# Altium footprint library PTZ.PcbLib: 51 footprints (part 1 of 4)
Each footprint in its own frame and in the unit in brackets; x right, y up, seen from the top. Pads: shape width x height; smd on the part's side, far side on the other; paste and mask are expansions set on the pad; w line width, h text height; cw(c..) or ccw(c..) is an arc to the next point about the centre after c.
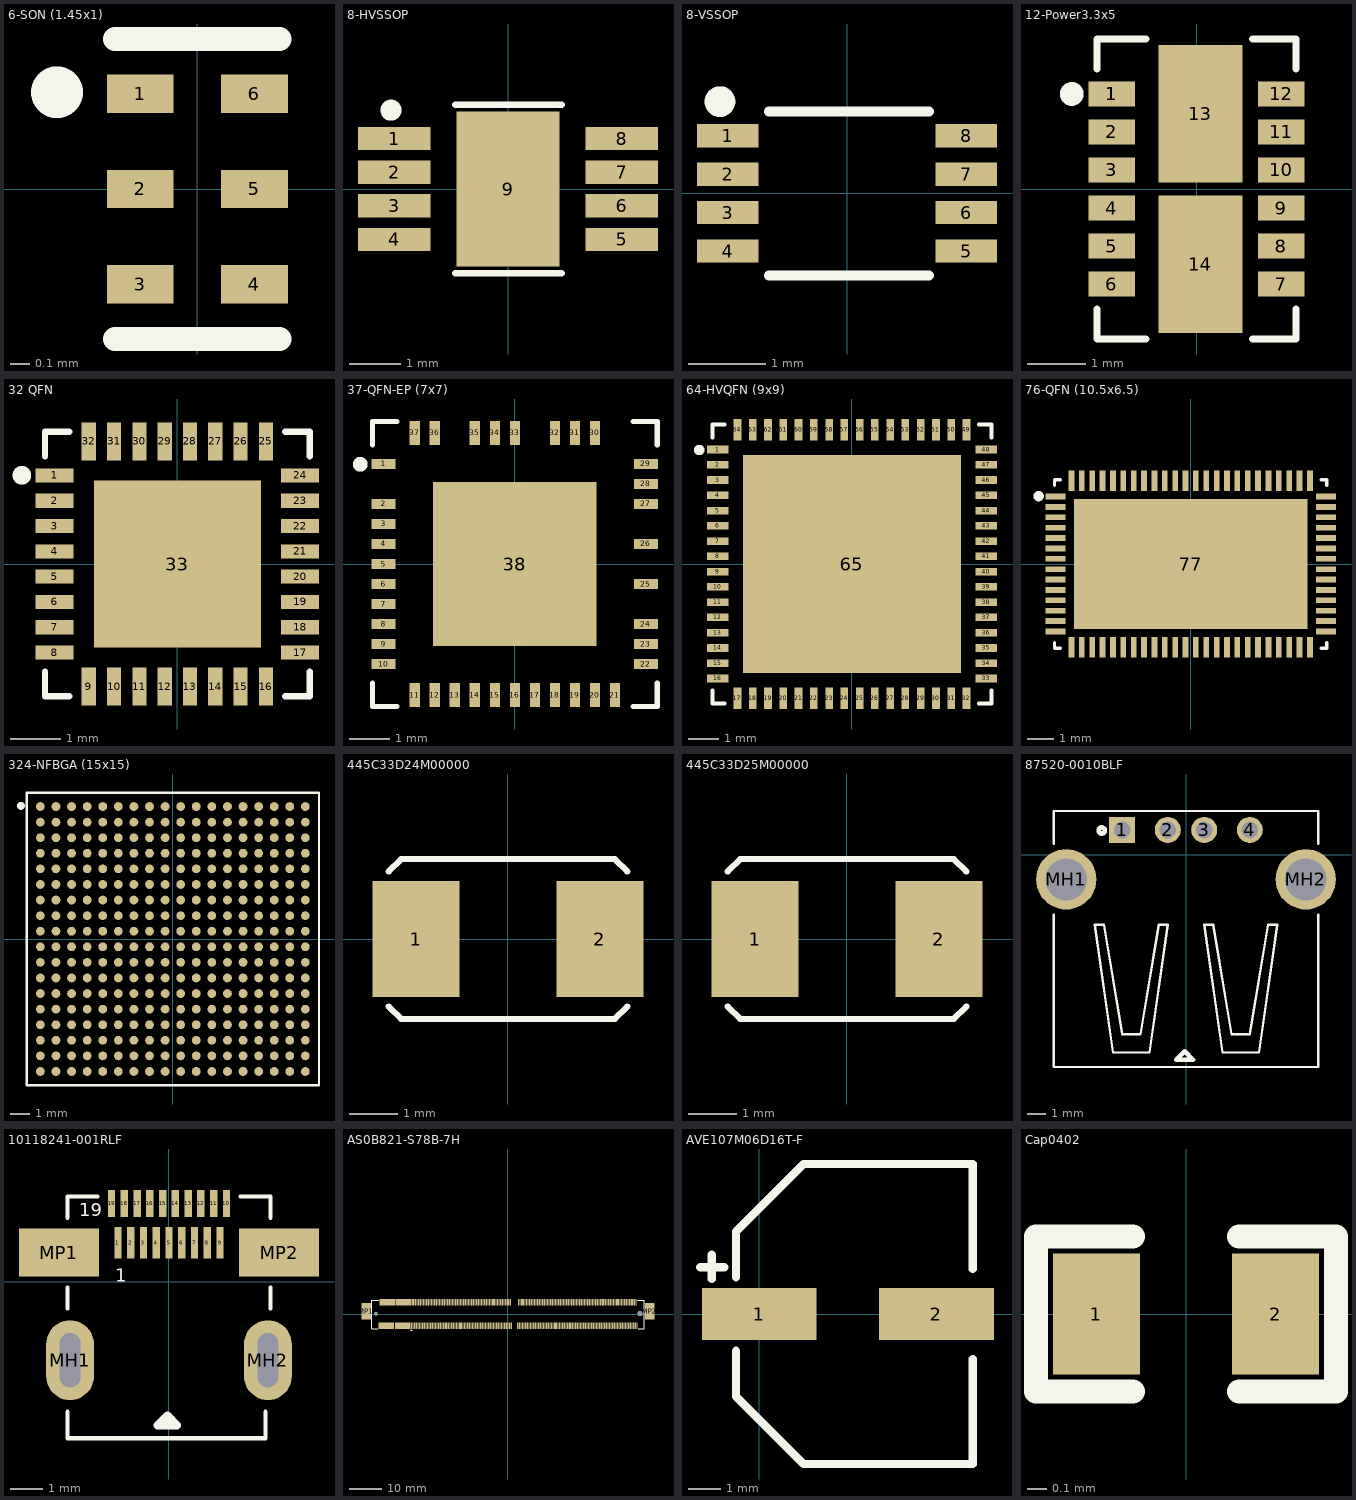
[diagram p0: the footprints below, top view; thin cyan lines are the x and y axes]

## 6-SON (1.45x1) [mm]
pads (6):
  rect 0.35x0.2 smd mask+0.102: 1(-0.3,0.5) 2(-0.3,0) 3(-0.3,-0.5) 4(0.3,-0.5) 5(0.3,0) 6(0.3,0.5)
Top Overlay:
  circle w0.2: c-0.737,0.508 r0.036
  lines w0.127: -0.432,-0.787 0.432,-0.787 ; -0.432,0.787 0.432,0.787
3D body "TPD4S012DRYR--3DModel-STEP-56544.STEP": height 0.6, standoff 0, extent -0.5,-0.725 0.5,0.725

## 8-HVSSOP [mm]
pads (9):
  rect 1.4x0.45 smd mask+0.102: 1(-2.2,0.975) 2(-2.2,0.325) 3(-2.2,-0.325) 4(-2.2,-0.975) 5(2.2,-0.975) 6(2.2,-0.325) 7(2.2,0.325) 8(2.2,0.975)
  rect 2x3 smd mask+0.102: 9(0,0)
Top Overlay:
  circle w0.254: c-2.261,1.524 r0.076
  lines w0.127: -1.016,-1.626 1.041,-1.626 ; -1.016,1.626 1.041,1.626
3D body "TPS2051BDGN.STEP": height 1.1, standoff 0, extent -2.45,-1.5 2.45,1.5

## 8-VSSOP [mm]
pads (8):
  rect 0.8x0.3 smd mask+0.102: 1(-1.55,0.75) 2(-1.55,0.25) 3(-1.55,-0.25) 4(-1.55,-0.75) 5(1.55,-0.75) 6(1.55,-0.25) 7(1.55,0.25) 8(1.55,0.75)
Top Overlay:
  circle w0.254: c-1.651,1.194 r0.072
  lines w0.127: -1.016,-1.067 1.067,-1.067 ; -1.016,1.067 1.067,1.067
3D body "SN74LVC2G241DCUT.STEP": height 0.9, standoff 0, extent -1.55,-1 1.55,1

## 12-Power3.3x5 [mm]
pads (15):
  rect 0.8x0.42 smd mask+0.102: 1(-1.45,1.625) 1(-1.45,1.625) 2(-1.45,0.975) 3(-1.45,0.325) 4(-1.45,-0.325) 5(-1.45,-0.975) 6(-1.45,-1.625) 7(1.45,-1.625) 8(1.45,-0.975) 9(1.45,-0.325) 10(1.45,0.325) 11(1.45,0.975) 12(1.45,1.625)
  rect 1.44x2.35 smd mask+0.102: 13(0.066,1.288) 14(0.066,-1.288)
Top Overlay:
  circle w0.254: c-2.134,1.626 r0.076
  lines w0.127: -1.702,-2.057 -1.702,-2.565 -0.864,-2.565 ; -1.702,2.057 -1.702,2.565 -0.864,2.565 ; 0.965,-2.565 1.702,-2.565 1.702,-2.057 ; 0.965,2.565 1.702,2.565 1.702,2.057
3D body "483BN.STEP": height 0.75, standoff 0, extent -1.65,-2.5 1.65,2.5

## 32 QFN [mm]
pads (33):
  rect 0.75x0.28 smd: 1(-2.425,1.75) 2(-2.425,1.25) 3(-2.425,0.75) 4(-2.425,0.25) 5(-2.425,-0.25) 6(-2.425,-0.75) 7(-2.425,-1.25) 8(-2.425,-1.75) 17(2.425,-1.75) 18(2.425,-1.25) 19(2.425,-0.75) 20(2.425,-0.25) 21(2.425,0.25) 22(2.425,0.75) 23(2.425,1.25) 24(2.425,1.75)
  rect 0.28x0.75 smd: 9(-1.75,-2.425) 10(-1.25,-2.425) 11(-0.75,-2.425) 12(-0.25,-2.425) 13(0.25,-2.425) 14(0.75,-2.425) 15(1.25,-2.425) 16(1.75,-2.425) 25(1.75,2.425) 26(1.25,2.425) 27(0.75,2.425) 28(0.25,2.425) 29(-0.25,2.425) 30(-0.75,2.425) 31(-1.25,2.425) 32(-1.75,2.425)
  rect 3.3x3.3 smd: 33(0,0)
Top Overlay:
  circle w0.254: c-3.073,1.753 r0.057
  lines w0.127: -2.616,-2.134 -2.616,-2.616 -2.134,-2.616 ; -2.616,2.134 -2.616,2.616 -2.134,2.616 ; 2.134,-2.616 2.616,-2.616 2.616,-2.134 ; 2.134,2.616 2.616,2.616 2.616,2.134
3D body "QFN32_5X5MC_MCH.step": height 1.65, standoff 0, extent -2.553,-2.553 2.553,2.553

## 37-QFN-EP (7x7) [mm]
pads (38):
  rect 0.6x0.254 smd: 1(-3.275,2.5) 2(-3.275,1.5) 3(-3.275,1) 4(-3.275,0.5) 5(-3.275,0) 6(-3.275,-0.5) 7(-3.275,-1) 8(-3.275,-1.5) 9(-3.275,-2) 10(-3.275,-2.5) 22(3.275,-2.5) 23(3.275,-2) 24(3.275,-1.5) 25(3.275,-0.5) 26(3.275,0.5) 27(3.275,1.5) 28(3.275,2) 29(3.275,2.5)
  rect 0.254x0.6 smd: 11(-2.5,-3.275) 12(-2,-3.275) 13(-1.5,-3.275) 14(-1,-3.275) 15(-0.5,-3.275) 16(0,-3.275) 17(0.5,-3.275) 18(1,-3.275) 19(1.5,-3.275) 20(2,-3.275) 21(2.5,-3.275) 30(2,3.275) 31(1.5,3.275) 32(1,3.275) 33(0,3.275) 34(-0.5,3.275) 35(-1,3.275) 36(-2,3.275) 37(-2.5,3.275)
  rect 4.089x4.089 smd: 38(0,0)
Top Overlay:
  circle w0.254: c-3.861,2.489 r0.057
  lines w0.127: -3.556,-2.972 -3.556,-3.556 -2.946,-3.556 ; -3.556,2.972 -3.556,3.556 -2.946,3.556 ; 2.946,-3.556 3.556,-3.556 3.556,-2.972 ; 2.946,3.556 3.556,3.556 3.556,2.972
3D body "QFN37_7X7_TRI.step": height 0.89, standoff 0, extent -3.505,-3.505 3.505,3.505

## 64-HVQFN (9x9) [mm]
pads (65):
  rect 0.7x0.25 smd: 1(-4.4,3.75) 2(-4.4,3.25) 3(-4.4,2.75) 4(-4.4,2.25) 5(-4.4,1.75) 6(-4.4,1.25) 7(-4.4,0.75) 8(-4.4,0.25) 9(-4.4,-0.25) 10(-4.4,-0.75) 11(-4.4,-1.25) 12(-4.4,-1.75) 13(-4.4,-2.25) 14(-4.4,-2.75) 15(-4.4,-3.25) 16(-4.4,-3.75) 33(4.4,-3.75) 34(4.4,-3.25) 35(4.4,-2.75) 36(4.4,-2.25) 37(4.4,-1.75) 38(4.4,-1.25) 39(4.4,-0.75) 40(4.4,-0.25) 41(4.4,0.25) 42(4.4,0.75) 43(4.4,1.25) 44(4.4,1.75) 45(4.4,2.25) 46(4.4,2.75) 47(4.4,3.25) 48(4.4,3.75)
  rect 0.25x0.7 smd: 17(-3.75,-4.4) 18(-3.25,-4.4) 19(-2.75,-4.4) 20(-2.25,-4.4) 21(-1.75,-4.4) 22(-1.25,-4.4) 23(-0.75,-4.4) 24(-0.25,-4.4) 25(0.25,-4.4) 26(0.75,-4.4) 27(1.25,-4.4) 28(1.75,-4.4) 29(2.25,-4.4) 30(2.75,-4.4) 31(3.25,-4.4) 32(3.75,-4.4) 49(3.75,4.4) 50(3.25,4.4) 51(2.75,4.4) 52(2.25,4.4) 53(1.75,4.4) 54(1.25,4.4) 55(0.75,4.4) 56(0.25,4.4) 57(-0.25,4.4) 58(-0.75,4.4) 59(-1.25,4.4) 60(-1.75,4.4) 61(-2.25,4.4) 62(-2.75,4.4) 63(-3.25,4.4) 64(-3.75,4.4)
  rect 7.15x7.15 smd: 65(0,0)
Top Overlay:
  circle w0.2: c-5.004,3.734 r0.072
  lines w0.127: -4.572,-4.14 -4.572,-4.572 -4.166,-4.572 ; -4.572,4.14 -4.572,4.572 -4.166,4.572 ; 4.166,-4.572 4.572,-4.572 4.572,-4.14 ; 4.166,4.572 4.572,4.572 4.572,4.14
3D body "User Library-QFN64-2.step": height 0.9, standoff 0, extent -4.52,-4.52 4.52,4.52

## 76-QFN (10.5x6.5) [mm]
pads (77):
  rect 0.78x0.22 smd: 1(-5.215,2.6) 2(-5.215,2.2) 3(-5.215,1.8) 4(-5.215,1.4) 5(-5.215,1) 6(-5.215,0.6) 7(-5.215,0.2) 8(-5.215,-0.2) 9(-5.215,-0.6) 10(-5.215,-1) 11(-5.215,-1.4) 12(-5.215,-1.8) 13(-5.215,-2.2) 14(-5.215,-2.6) 39(5.215,-2.6) 40(5.215,-2.2) 41(5.215,-1.8) 42(5.215,-1.4) 43(5.215,-1) 44(5.215,-0.6) 45(5.215,-0.2) 46(5.215,0.2) 47(5.215,0.6) 48(5.215,1) 49(5.215,1.4) 50(5.215,1.8) 51(5.215,2.2) 52(5.215,2.6)
  rect 0.22x0.78 smd: 15(-4.6,-3.215) 16(-4.2,-3.215) 17(-3.8,-3.215) 18(-3.4,-3.215) 19(-3,-3.215) 20(-2.6,-3.215) 21(-2.2,-3.215) 22(-1.8,-3.215) 23(-1.4,-3.215) 24(-1,-3.215) 25(-0.6,-3.215) 26(-0.2,-3.215) 27(0.2,-3.215) 28(0.6,-3.215) 29(1,-3.215) 30(1.4,-3.215) 31(1.8,-3.215) 32(2.2,-3.215) 33(2.6,-3.215) 34(3,-3.215) 35(3.4,-3.215) 36(3.8,-3.215) 37(4.2,-3.215) 38(4.6,-3.215) 53(4.6,3.215) 54(4.2,3.215) 55(3.8,3.215) 56(3.4,3.215) 57(3,3.215) 58(2.6,3.215) 59(2.2,3.215) 60(1.8,3.215) 61(1.4,3.215) 62(1,3.215) 63(0.6,3.215) 64(0.2,3.215) 65(-0.2,3.215) 66(-0.6,3.215) 67(-1,3.215) 68(-1.4,3.215) 69(-1.8,3.215) 70(-2.2,3.215) 71(-2.6,3.215) 72(-3,3.215) 73(-3.4,3.215) 74(-3.8,3.215) 75(-4.2,3.215) 76(-4.6,3.215)
  rect 9x5 smd paste-5: 77(0,0)
Top Overlay:
  circle w0.2: c-5.867,2.616 r0.1
  lines w0.127: -5.25,-3.03 -5.25,-3.25 -5.03,-3.25 ; -5.25,3.03 -5.25,3.25 -5.03,3.25 ; 5.03,-3.25 5.25,-3.25 5.25,-3.03 ; 5.03,3.25 5.25,3.25 5.25,3.03
Top Paste:
  region: 3.95,-2.205 2.05,-2.205 2.05,-1.145 3.95,-1.145
  region: 0.95,-2.205 -0.95,-2.205 -0.95,-1.145 0.95,-1.145
  region: -2.05,-2.205 -3.95,-2.205 -3.95,-1.145 -2.05,-1.145
  region: 3.95,-0.535 2.05,-0.535 2.05,0.525 3.95,0.525
  region: 0.95,-0.535 -0.95,-0.535 -0.95,0.525 0.95,0.525
  region: -2.05,-0.535 -3.95,-0.535 -3.95,0.525 -2.05,0.525
  region: 3.95,1.135 2.05,1.135 2.05,2.195 3.95,2.195
  region: 0.95,1.135 -0.95,1.135 -0.95,2.195 0.95,2.195
  region: -2.05,1.135 -3.95,1.135 -3.95,2.195 -2.05,2.195
3D body "QFN76_10P5X6P5_TRI.step": height 0.89, standoff 0, extent -5.245,-3.251 5.245,3.251

## 324-NFBGA (15x15) [mm]
pads (324):
  round 0.45 smd: A1(-6.8,6.8) A2(-6,6.8) A3(-5.2,6.8) A4(-4.4,6.8) A5(-3.6,6.8) A6(-2.8,6.8) A7(-2,6.8) A8(-1.2,6.8) A9(-0.4,6.8) A10(0.4,6.8) A11(1.2,6.8) A12(2,6.8) A13(2.8,6.8) A14(3.6,6.8) A15(4.4,6.8) A16(5.2,6.8) A17(6,6.8) A18(6.8,6.8) B1(-6.8,6) B2(-6,6) B3(-5.2,6) B4(-4.4,6) B5(-3.6,6) B6(-2.8,6) B7(-2,6) B8(-1.2,6) B9(-0.4,6) B10(0.4,6) B11(1.2,6) B12(2,6) B13(2.8,6) B14(3.6,6) B15(4.4,6) B16(5.2,6) B17(6,6) B18(6.8,6) C1(-6.8,5.2) C2(-6,5.2) C3(-5.2,5.2) C4(-4.4,5.2) C5(-3.6,5.2) C6(-2.8,5.2) C7(-2,5.2) C8(-1.2,5.2) C9(-0.4,5.2) C10(0.4,5.2) C11(1.2,5.2) C12(2,5.2) C13(2.8,5.2) C14(3.6,5.2) C15(4.4,5.2) C16(5.2,5.2) C17(6,5.2) C18(6.8,5.2) D1(-6.8,4.4) D2(-6,4.4) D3(-5.2,4.4) D4(-4.4,4.4) D5(-3.6,4.4) D6(-2.8,4.4) D7(-2,4.4) D8(-1.2,4.4) D9(-0.4,4.4) D10(0.4,4.4) D11(1.2,4.4) D12(2,4.4) D13(2.8,4.4) D14(3.6,4.4) D15(4.4,4.4) D16(5.2,4.4) D17(6,4.4) D18(6.8,4.4) E1(-6.8,3.6) E2(-6,3.6) E3(-5.2,3.6) E4(-4.4,3.6) E5(-3.6,3.6) E6(-2.8,3.6) E7(-2,3.6) E8(-1.2,3.6) E9(-0.4,3.6) E10(0.4,3.6) E11(1.2,3.6) E12(2,3.6) E13(2.8,3.6) E14(3.6,3.6) E15(4.4,3.6) E16(5.2,3.6) E17(6,3.6) E18(6.8,3.6) F1(-6.8,2.8) F2(-6,2.8) F3(-5.2,2.8) F4(-4.4,2.8) F5(-3.6,2.8) F6(-2.8,2.8) F7(-2,2.8) F8(-1.2,2.8) F9(-0.4,2.8) F10(0.4,2.8) F11(1.2,2.8) F12(2,2.8) F13(2.8,2.8) F14(3.6,2.8) F15(4.4,2.8) F16(5.2,2.8) F17(6,2.8) F18(6.8,2.8) G1(-6.8,2) G2(-6,2) G3(-5.2,2) G4(-4.4,2) G5(-3.6,2) G6(-2.8,2) G7(-2,2) G8(-1.2,2) G9(-0.4,2) G10(0.4,2) G11(1.2,2) G12(2,2) G13(2.8,2) G14(3.6,2) G15(4.4,2) G16(5.2,2) G17(6,2) G18(6.8,2) H1(-6.8,1.2) H2(-6,1.2) H3(-5.2,1.2) H4(-4.4,1.2) H5(-3.6,1.2) H6(-2.8,1.2) H7(-2,1.2) H8(-1.2,1.2) H9(-0.4,1.2) H10(0.4,1.2) H11(1.2,1.2) H12(2,1.2) H13(2.8,1.2) H14(3.6,1.2) H15(4.4,1.2) H16(5.2,1.2) H17(6,1.2) H18(6.8,1.2) J1(-6.8,0.4) J2(-6,0.4) J3(-5.2,0.4) J4(-4.4,0.4) J5(-3.6,0.4) J6(-2.8,0.4) J7(-2,0.4) J8(-1.2,0.4) J9(-0.4,0.4) J10(0.4,0.4) J11(1.2,0.4) J12(2,0.4) J13(2.8,0.4) J14(3.6,0.4) J15(4.4,0.4) J16(5.2,0.4) J17(6,0.4) J18(6.8,0.4) K1(-6.8,-0.4) K2(-6,-0.4) K3(-5.2,-0.4) K4(-4.4,-0.4) K5(-3.6,-0.4) K6(-2.8,-0.4) K7(-2,-0.4) K8(-1.2,-0.4) K9(-0.4,-0.4) K10(0.4,-0.4) K11(1.2,-0.4) K12(2,-0.4) K13(2.8,-0.4) K14(3.6,-0.4) K15(4.4,-0.4) K16(5.2,-0.4) K17(6,-0.4) K18(6.8,-0.4) L1(-6.8,-1.2) L2(-6,-1.2) L3(-5.2,-1.2) L4(-4.4,-1.2) L5(-3.6,-1.2) L6(-2.8,-1.2) L7(-2,-1.2) L8(-1.2,-1.2) L9(-0.4,-1.2) L10(0.4,-1.2) L11(1.2,-1.2) L12(2,-1.2) L13(2.8,-1.2) L14(3.6,-1.2) L15(4.4,-1.2) L16(5.2,-1.2) L17(6,-1.2) L18(6.8,-1.2) M1(-6.8,-2) M2(-6,-2) M3(-5.2,-2) M4(-4.4,-2) M5(-3.6,-2) M6(-2.8,-2) M7(-2,-2) M8(-1.2,-2) M9(-0.4,-2) M10(0.4,-2) M11(1.2,-2) M12(2,-2) M13(2.8,-2) M14(3.6,-2) M15(4.4,-2) M16(5.2,-2) M17(6,-2) M18(6.8,-2) N1(-6.8,-2.8) N2(-6,-2.8) N3(-5.2,-2.8) N4(-4.4,-2.8) N5(-3.6,-2.8) N6(-2.8,-2.8) N7(-2,-2.8) N8(-1.2,-2.8) N9(-0.4,-2.8) N10(0.4,-2.8) N11(1.2,-2.8) N12(2,-2.8) N13(2.8,-2.8) N14(3.6,-2.8) N15(4.4,-2.8) N16(5.2,-2.8) N17(6,-2.8) N18(6.8,-2.8) P1(-6.8,-3.6) P2(-6,-3.6) P3(-5.2,-3.6) P4(-4.4,-3.6) P5(-3.6,-3.6) P6(-2.8,-3.6) P7(-2,-3.6) P8(-1.2,-3.6) P9(-0.4,-3.6) P10(0.4,-3.6) P11(1.2,-3.6) P12(2,-3.6) P13(2.8,-3.6) P14(3.6,-3.6) P15(4.4,-3.6) P16(5.2,-3.6) P17(6,-3.6) P18(6.8,-3.6) R1(-6.8,-4.4) R2(-6,-4.4) R3(-5.2,-4.4) R4(-4.4,-4.4) R5(-3.6,-4.4) R6(-2.8,-4.4) R7(-2,-4.4) R8(-1.2,-4.4) R9(-0.4,-4.4) R10(0.4,-4.4) R11(1.2,-4.4) R12(2,-4.4) R13(2.8,-4.4) R14(3.6,-4.4) R15(4.4,-4.4) R16(5.2,-4.4) R17(6,-4.4) R18(6.8,-4.4) T1(-6.8,-5.2) T2(-6,-5.2) T3(-5.2,-5.2) T4(-4.4,-5.2) T5(-3.6,-5.2) T6(-2.8,-5.2) T7(-2,-5.2) T8(-1.2,-5.2) T9(-0.4,-5.2) T10(0.4,-5.2) T11(1.2,-5.2) T12(2,-5.2) T13(2.8,-5.2) T14(3.6,-5.2) T15(4.4,-5.2) T16(5.2,-5.2) T17(6,-5.2) T18(6.8,-5.2) U1(-6.8,-6) U2(-6,-6) U3(-5.2,-6) U4(-4.4,-6) U5(-3.6,-6) U6(-2.8,-6) U7(-2,-6) U8(-1.2,-6) U9(-0.4,-6) U10(0.4,-6) U11(1.2,-6) U12(2,-6) U13(2.8,-6) U14(3.6,-6) U15(4.4,-6) U16(5.2,-6) U17(6,-6) U18(6.8,-6) V1(-6.8,-6.8) V2(-6,-6.8) V3(-5.2,-6.8) V4(-4.4,-6.8) V5(-3.6,-6.8) V6(-2.8,-6.8) V7(-2,-6.8) V8(-1.2,-6.8) V9(-0.4,-6.8) V10(0.4,-6.8) V11(1.2,-6.8) V12(2,-6.8) V13(2.8,-6.8) V14(3.6,-6.8) V15(4.4,-6.8) V16(5.2,-6.8) V17(6,-6.8) V18(6.8,-6.8)
Top Overlay:
  circle w0.2: c-7.798,6.833 r0.1
  lines w0.127: -7.5,-7.5 7.5,-7.5 7.5,7.5 -7.5,7.5 -7.5,-7.5

## 445C33D24M00000 [mm]
pads (2):
  rect 1.8x2.4 smd mask+0.06: 1(-1.9,0) 2(1.9,0)
Top Overlay:
  lines w0.127: -2.464,-1.397 -2.21,-1.651 2.21,-1.651 2.464,-1.397 ; -2.464,1.397 -2.21,1.651 2.21,1.651 2.464,1.397
3D body "User Library-445-CRYTAL-SMD.step": height 1.35, standoff 0, extent -2.5,-1.6 2.5,1.6

## 445C33D25M00000 [mm]
pads (2):
  rect 1.8x2.4 smd mask+0.06: 1(-1.9,0) 2(1.9,0)
Top Overlay:
  lines w0.127: -2.464,-1.397 -2.21,-1.651 2.21,-1.651 2.464,-1.397 ; -2.464,1.397 -2.21,1.651 2.21,1.651 2.464,1.397
3D body "User Library-445-CRYTAL-SMD.step": height 1.35, standoff 0, extent -2.5,-1.6 2.5,1.6

## 87520-0010BLF [mm]
pads (6):
  rect 1.428x1.428 hole 0.92: 1(-3.5,1.355)
  round 1.428 hole 0.92: 2(-1,1.355) 3(1,1.355) 4(3.5,1.355)
  round 3.316 hole 2.3: MH1(-6.57,-1.355) MH2(6.57,-1.355)
Top Overlay:
  circle w0.254: c-4.623,1.321 r0.17
  lines w0.127: -7.25,-3.305 -7.25,-11.655 7.25,-11.655 7.25,-3.305 ; -7.25,0.595 -7.25,2.395 7.25,2.395 7.25,0.595 ; -5,-3.855 -4.5,-3.855 -3.5,-9.855 -2.5,-9.855 -1.5,-3.855 -1,-3.855 -2,-10.855 -4,-10.855 -5,-3.855 ; 1,-3.855 1.5,-3.855 2.5,-9.855 3.5,-9.855 4.5,-3.855 5,-3.855 4,-10.855 2,-10.855 1,-3.855
  lines w0.254: -0.533,-11.252 -0.076,-10.795 0.381,-11.252 -0.533,-11.252

## 10118241-001RLF [mm]
pads (23):
  rect 0.23x1 smd: 1(-1.6,1.223) 2(-1.2,1.223) 3(-0.8,1.223) 4(-0.4,1.223) 5(0,1.223) 6(0.4,1.223) 7(0.8,1.223) 8(1.2,1.223) 9(1.6,1.223)
  rect 0.23x0.85 smd: 10(1.8,2.458) 11(1.4,2.458) 12(1,2.458) 13(0.6,2.458) 14(0.2,2.458) 15(-0.2,2.458) 16(-0.6,2.458) 17(-1,2.458) 18(-1.4,2.458) 19(-1.8,2.458)
  oval 1.5x2.5 hole 0.65 slot 1.7 at 90 deg: MH1(-3.1,-2.457) MH2(3.1,-2.457)
  rect 2.5x1.5 smd: MP1(-3.45,0.913) MP2(3.45,0.913)
Top Overlay:
  lines w0.127: -3.175,-4.073 -3.175,-4.902 3.025,-4.902 3.025,-4.073 ; -3.175,-0.842 -3.175,-0.182 ; -3.175,2.007 -3.175,2.667 -2.235,2.667 ; 2.235,2.667 3.175,2.667 3.175,2.007 ; 3.175,-0.842 3.175,-0.182
  lines w0.254: -0.356,-4.496 -0.051,-4.191 0.254,-4.496 -0.356,-4.496
  text "19" at -2.819,2.057 h0.41
  text "1" at -1.676,0 h0.41
3D body "10118241-001rlf1_asm.STEP": height 3.03, standoff -0.5, extent -4.455,-4.893 4.445,2.607

## AS0B821-S78B-7H [mm]
pads (282):
  rect 0.35x2 smd: 1(-30,-3.625) 2(-29.75,3.625) 3(-29.5,-3.625) 4(-29.25,3.625) 5(-29,-3.625) 6(-28.75,3.625) 7(-28.5,-3.625) 8(-28.25,3.625) 9(-28,-3.625) 10(-27.75,3.625) 11(-27.5,-3.625) 12(-27.25,3.625) 13(-27,-3.625) 14(-26.75,3.625) 15(-26.5,-3.625) 16(-26.25,3.625) 17(-26,-3.625) 18(-25.75,3.625) 19(-25.5,-3.625) 20(-25.25,3.625) 21(-25,-3.625) 22(-24.75,3.625) 23(-24.5,-3.625) 24(-24.25,3.625) 25(-24,-3.625) 26(-23.75,3.625) 27(-23.5,-3.625) 28(-23.25,3.625) 29(-23,-3.625) 30(-22.75,3.625) 31(-22.5,-3.625) 32(-22.25,3.625) 33(-22,-3.625) 34(-21.75,3.625) 35(-21.5,-3.625) 36(-21.25,3.625) 37(-21,-3.625) 38(-20.75,3.625) 39(-20.5,-3.625) 40(-20.25,3.625) 41(-20,-3.625) 42(-19.75,3.625) 43(-19.5,-3.625) 44(-19.25,3.625) 45(-19,-3.625) 46(-18.75,3.625) 47(-18.5,-3.625) 48(-18.25,3.625) 49(-18,-3.625) 50(-17.75,3.625) 51(-17.5,-3.625) 52(-17.25,3.625) 53(-17,-3.625) 54(-16.75,3.625) 55(-16.5,-3.625) 56(-16.25,3.625) 57(-16,-3.625) 58(-15.75,3.625) 59(-15.5,-3.625) 60(-15.25,3.625) 61(-15,-3.625) 62(-14.75,3.625) 63(-14.5,-3.625) 64(-14.25,3.625) 65(-14,-3.625) 66(-13.75,3.625) 67(-13.5,-3.625) 68(-13.25,3.625) 69(-13,-3.625) 70(-12.75,3.625) 71(-12.5,-3.625) 72(-12.25,3.625) 73(-12,-3.625) 74(-11.75,3.625) 75(-11.5,-3.625) 76(-11.25,3.625) 77(-11,-3.625) 78(-10.75,3.625) 79(-10.5,-3.625) 80(-10.25,3.625) 81(-10,-3.625) 82(-9.75,3.625) 83(-9.5,-3.625) 84(-9.25,3.625) 85(-9,-3.625) 86(-8.75,3.625) 87(-8.5,-3.625) 88(-8.25,3.625) 89(-8,-3.625) 90(-7.75,3.625) 91(-7.5,-3.625) 92(-7.25,3.625) 93(-7,-3.625) 94(-6.75,3.625) 95(-6.5,-3.625) 96(-6.25,3.625) 97(-6,-3.625) 98(-5.75,3.625) 99(-5.5,-3.625) 100(-5.25,3.625) 101(-5,-3.625) 102(-4.75,3.625) 103(-4.5,-3.625) 104(-4.25,3.625) 105(-4,-3.625) 106(-3.75,3.625) 107(-3.5,-3.625) 108(-3.25,3.625) 109(-3,-3.625) 110(-2.75,3.625) 111(-2.5,-3.625) 112(-2.25,3.625) 113(-2,-3.625) 114(-1.75,3.625) 115(-1.5,-3.625) 116(-1.25,3.625) 117(-1,-3.625) 118(-0.75,3.625) 119(-0.5,-3.625) 120(-0.25,3.625) 121(0,-3.625) 122(0.25,3.625) 123(0.5,-3.625) 124(0.75,3.625) 125(1,-3.625) 133(3,-3.625) 134(3.25,3.625) 135(3.5,-3.625) 136(3.75,3.625) 137(4,-3.625) 138(4.25,3.625) 139(4.5,-3.625) 140(4.75,3.625) 141(5,-3.625) 142(5.25,3.625) 143(5.5,-3.625) 144(5.75,3.625) 145(6,-3.625) 146(6.25,3.625) 147(6.5,-3.625) 148(6.75,3.625) 149(7,-3.625) 150(7.25,3.625) 151(7.5,-3.625) 152(7.75,3.625) 153(8,-3.625) 154(8.25,3.625) 155(8.5,-3.625) 156(8.75,3.625) 157(9,-3.625) 158(9.25,3.625) 159(9.5,-3.625) 160(9.75,3.625) 161(10,-3.625) 162(10.25,3.625) 163(10.5,-3.625) 164(10.75,3.625) 165(11,-3.625) 166(11.25,3.625) 167(11.5,-3.625) 168(11.75,3.625) 169(12,-3.625) 170(12.25,3.625) 171(12.5,-3.625) 172(12.75,3.625) 173(13,-3.625) 174(13.25,3.625) 175(13.5,-3.625) 176(13.75,3.625) 177(14,-3.625) 178(14.25,3.625) 179(14.5,-3.625) 180(14.75,3.625) 181(15,-3.625) 182(15.25,3.625) 183(15.5,-3.625) 184(15.75,3.625) 185(16,-3.625) 186(16.25,3.625) 187(16.5,-3.625) 188(16.75,3.625) 189(17,-3.625) 190(17.25,3.625) 191(17.5,-3.625) 192(17.75,3.625) 193(18,-3.625) 194(18.25,3.625) 195(18.5,-3.625) 196(18.75,3.625) 197(19,-3.625) 198(19.25,3.625) 199(19.5,-3.625) 200(19.75,3.625) 201(20,-3.625) 202(20.25,3.625) 203(20.5,-3.625) 204(20.75,3.625) 205(21,-3.625) 206(21.25,3.625) 207(21.5,-3.625) 208(21.75,3.625) 209(22,-3.625) 210(22.25,3.625) 211(22.5,-3.625) 212(22.75,3.625) 213(23,-3.625) 214(23.25,3.625) 215(23.5,-3.625) 216(23.75,3.625) 217(24,-3.625) 218(24.25,3.625) 219(24.5,-3.625) 220(24.75,3.625) 221(25,-3.625) 222(25.25,3.625) 223(25.5,-3.625) 224(25.75,3.625) 225(26,-3.625) 226(26.25,3.625) 227(26.5,-3.625) 228(26.75,3.625) 229(27,-3.625) 230(27.25,3.625) 231(27.5,-3.625) 232(27.75,3.625) 233(28,-3.625) 234(28.25,3.625) 235(28.5,-3.625) 236(28.75,3.625) 237(29,-3.625) 238(29.25,3.625) 239(29.5,-3.625) 240(29.75,3.625) 241(30,-3.625) 242(30.25,3.625) 243(30.5,-3.625) 244(30.75,3.625) 245(31,-3.625) 246(31.25,3.625) 247(31.5,-3.625) 248(31.75,3.625) 249(32,-3.625) 250(32.25,3.625) 251(32.5,-3.625) 252(32.75,3.625) 253(33,-3.625) 254(33.25,3.625) 255(33.5,-3.625) 256(33.75,3.625) 257(34,-3.625) 258(34.25,3.625) 259(34.5,-3.625) 260(34.75,3.625) 261(35,-3.625) 262(35.25,3.625) 263(35.5,-3.625) 264(35.75,3.625) 265(36,-3.625) 266(36.25,3.625) 267(36.5,-3.625) 268(36.75,3.625) 269(37,-3.625) 270(37.25,3.625) 271(37.5,-3.625) 272(37.75,3.625) 273(38,-3.625) 274(38.25,3.625) 275(38.5,-3.625) 276(38.75,3.625) 277(39,-3.625) 278(39.25,3.625) 279(39.5,-3.625) 280(39.75,3.625) 281(40,-3.625)
  rect 4.82x2 smd: E1(-37.75,-3.625) E2(-37.5,3.625) E3(-32.75,-3.625) E4(-32.5,3.625)
  rect 3x5.15 smd: MP1(-44,0.875) MP2(44,0.875)
  round 1.1 hole 1.1 unplated: ""(-41,0.125)
  round 1.6 hole 1.6 unplated: ""(41,0.125)
Top Overlay:
  lines w0.127: -40.5,-4.575 -42.3,-4.575 -42.3,4.325 -40.2,4.325 ; 40.2,4.325 42.3,4.325 42.3,-4.575 40.5,-4.575
  lines w0.254: -30.226,-5.055 -29.769,-5.055 -29.997,-4.826 -30.226,-5.055
3D body "Foxconn_AS0B821-S78B-7H_AS0B826-S78B-7H_AS0B821-S78B-1H_AS0B826-S78B-1H_317-0000-1969_MXM_Socket.STEP": height 7.8, standoff -1.4, extent -44.443,-4.446 44.457,4.454

## AVE107M06D16T-F [mm]
pads (2):
  rect 3.5x1.6 smd mask+0.06: 1(0,0) 2(5.4,0)
Top Overlay:
  lines w0.254: -1.803,1.422 -1.067,1.422 ; -1.448,1.067 -1.448,1.803 ; -0.711,-1.118 -0.711,-2.515 1.346,-4.572 6.502,-4.572 6.502,-1.372 ; -0.711,1.118 -0.711,2.515 1.346,4.572 6.502,4.572 6.502,1.372

## Cap0402 [mil]
pads (2):
  rect 18x25 smd mask+2.36: 1(-18.5,0) 2(18.5,0)
Top Overlay:
  lines w5: -11,-16 -31,-16 -31,16 -11,16 ; 11,-16 31,-16 31,16 11,16
3D body "User Library-Capacitor 0402.step": height 18.5, standoff -1.18, extent -19.68,-9.84 19.7,9.85